# Altium schematic symbol library SS16.SchLib: 1 symbol
Pins are listed as number, name and electrical type; pins without a type are passive.

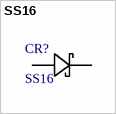
[diagram p0: symbol SS16]

## SS16
designator CR?
Description; Manufacturer_Name: onsemi; Copyright: Copyright (C) 2026 Ultra Librarian. All rights reserved.; Manufacturer_Part_Number: SS16
footprint SDO_SMA_403D_ONS
pins: 1, 2